# Altium integrated library MAX9924UAUB_T.IntLib: 1 symbol
Pins are listed as number, name and electrical type; pins without a type are passive.

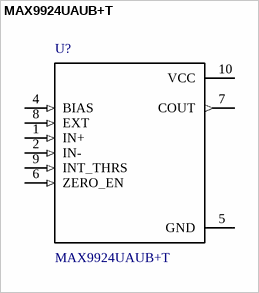
[diagram p0: symbol MAX9924UAUB+T]

## MAX9924UAUB+T
designator U?
SnapEDA_Link: https://www.snapeda.com/parts/MAX9924UAUB+T/Maxim+Integrated/view-part/?ref=snap; Check_prices: https://www.snapeda.com/parts/MAX9924UAUB+T/Maxim+Integrated/view-part/?ref=eda; Value: *
footprint *SOP50P490X110-10N
pins: 1 IN+ (in), 2 IN- (in), 4 BIAS (in), 5 GND (power), 6 ZERO_EN (in), 7 COUT (out), 8 EXT (in), 9 INT_THRS (in), 10 VCC (power)